# Altium footprint library CHIP-Library.PcbLib: 345 footprints (part 6 of 22)
Each footprint in its own frame and in the unit in brackets; x right, y up, seen from the top. Pads: shape width x height; smd on the part's side, far side on the other; paste and mask are expansions set on the pad; w line width, h text height; cw(c..) or ccw(c..) is an arc to the next point about the centre after c.
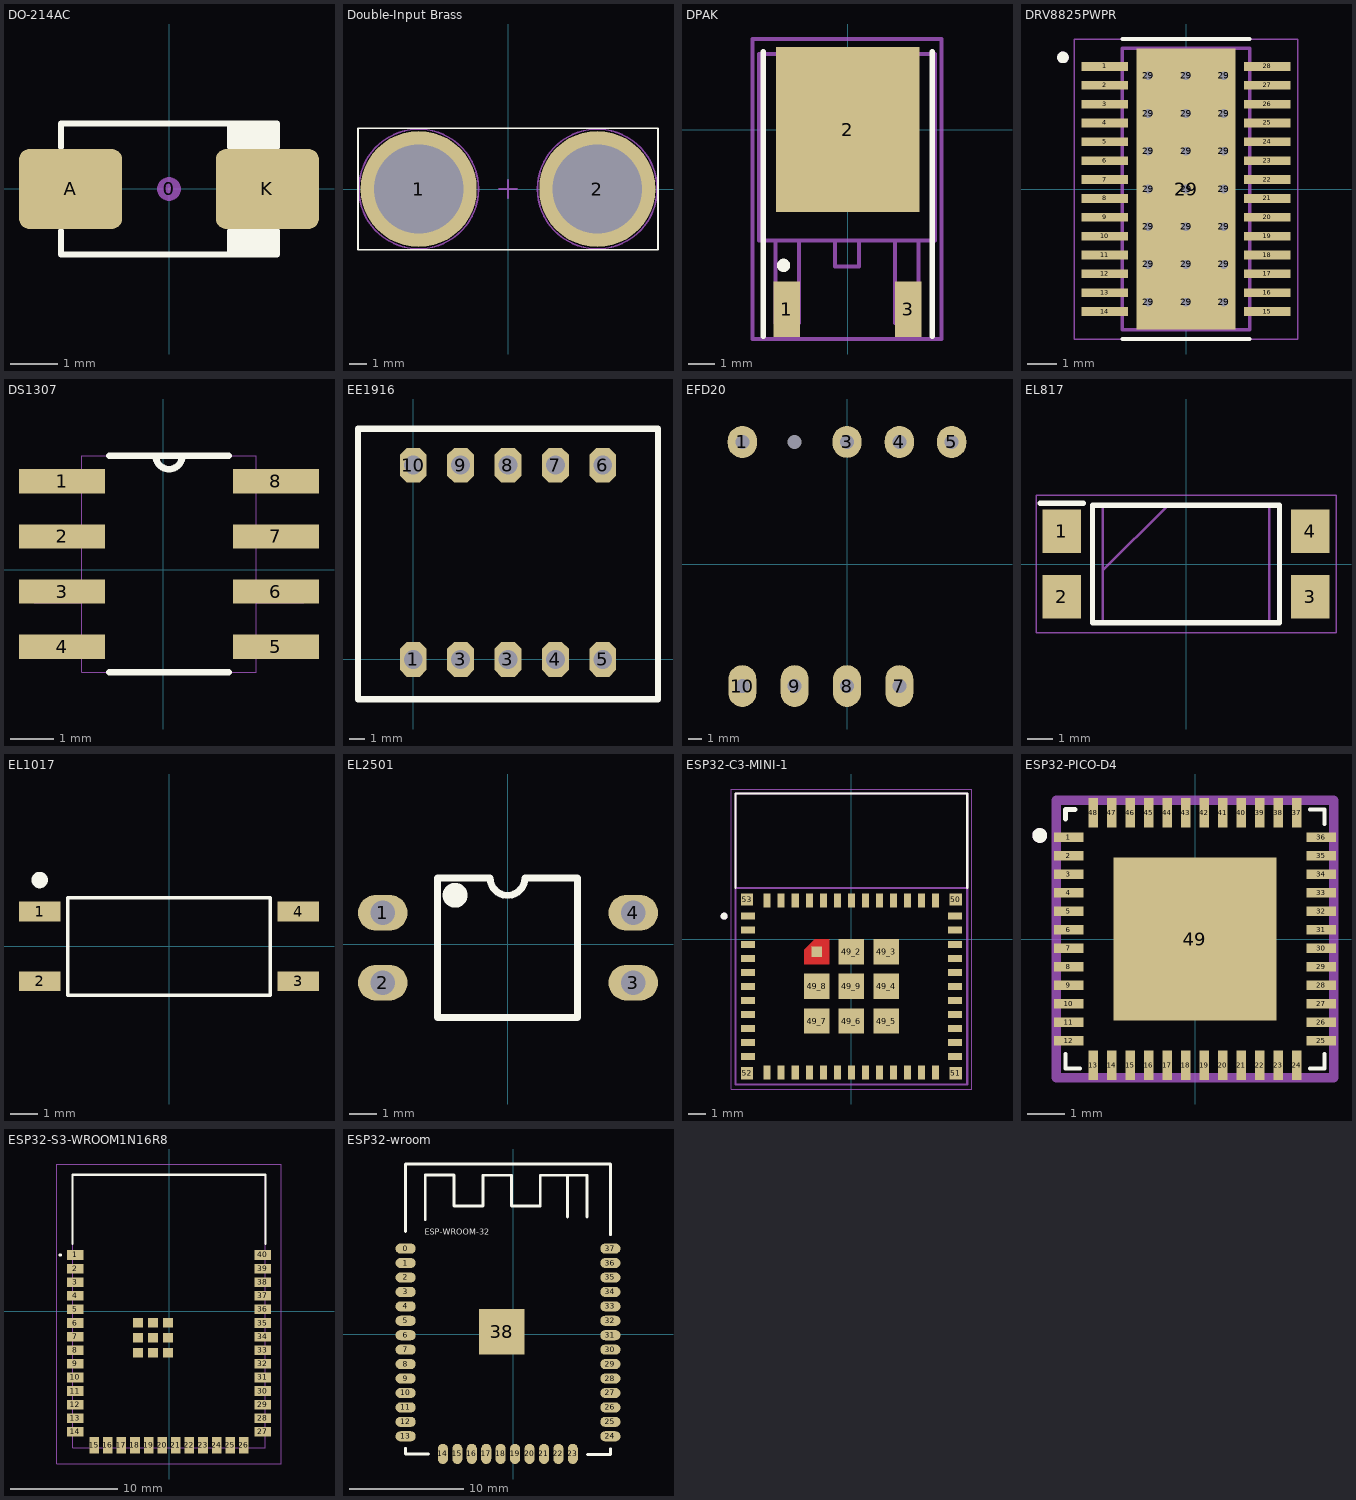
[diagram p5: the footprints below, top view; thin cyan lines are the x and y axes]

## DO-214AC [mm] "JEDEC DO214 variation AC. SMA"
height 2.5
pads (3):
  round 0.508 on Mech15: 0(0,0)
  rrect25% 2.2x1.7 smd: A(-2.1,0) K(2.1,0)
Top Overlay:
  rectangle: 1.3,0.9 2.3,1.4
  rectangle: 1.3,-1.4 2.3,-0.9
  lines w0.127: -2.3,-0.9 -2.3,-1.4 2.3,-1.4 2.3,-0.9 1.3,-0.9 1.3,-1.4 ; -2.3,0.9 -2.3,1.4 2.3,1.4 2.3,0.9 1.3,0.9 ; 1.3,0.911 1.3,1.4
3D body "SW3dPS-DO-214AC SMA.STEP": height 2.42, standoff 0.02, extent -2.6,-1.3 2.6,1.3

## Double-Input Brass [mm]
height 10.5
pads (2):
  round 6.5 hole 5: 1(-5,0) 2(5,0)
Top Overlay:
  lines w0.1: -8.4,-3.4 8.4,-3.4 8.4,3.4 -8.4,3.4 -8.4,-3.4
Mechanical 1:
  circle w0.1: c5,0 r3.35
  circle w0.1: c-5,0 r3.35
Mechanical 15:
  lines w0.1: -0.5,0 0.5,0 ; 0,-0.5 0,0.5
3D body: height 9, standoff -1, extent -7.54,-2.54 -2.46,2.54
3D body: height 9, standoff -1, extent 2.46,-2.54 7.54,2.54

## DPAK [mm]
height 9.45
pads (3):
  rect 1x2.1 smd: 1(-2.285,-6.75) 3(2.285,-6.75)
  rect 5.4x6.2 smd paste-3: 2(0,0)
Top Overlay:
  circle w0.25: c-2.41,-5.099 r0.125
  lines w0.2: -3.174,-7.766 -3.174,2.934 ; 3.176,-7.766 3.176,2.934
Top Paste:
  rectangle: 0.5,0.5 2.5,3
  rectangle: -2.5,0.5 -0.5,3
  rectangle: 0.5,-3 2.5,-0.5
  rectangle: -2.5,-3 -0.5,-0.5
Mechanical 4:
  lines w0.152: -3.326,-4.159 -3.326,2.851 ; -3.326,-4.159 3.278,-4.159 ; -3.326,-4.159 -3.326,2.851 ; -3.326,-4.159 3.278,-4.159 ; -3.326,2.851 3.278,2.851 ; -3.326,2.851 3.278,2.851 ; -2.717,-7.258 -1.828,-7.258 ; -2.717,-7.258 -2.717,-4.159 ; -2.717,-7.258 -1.828,-7.258 ; -2.717,-7.258 -2.717,-4.159 ; -2.717,-4.159 -1.828,-4.159 ; -2.717,-4.159 -1.828,-4.159 ; -1.828,-7.258 -1.828,-4.159 ; -1.828,-7.258 -1.828,-4.159 ; -0.482,-5.15 0.433,-5.15 ; -0.482,-5.15 -0.482,-4.159 -0.482,-5.15 ; -0.482,-5.15 0.433,-5.15 ; 0.433,-5.15 0.433,-4.159 0.433,-5.15 ; 1.779,-7.258 2.668,-7.258 ; 1.779,-7.258 1.779,-4.159 ; 1.779,-7.258 2.668,-7.258 ; 1.779,-7.258 1.779,-4.159 ; 1.779,-4.159 2.668,-4.159 ; 1.779,-4.159 2.668,-4.159 ; 2.668,-7.258 2.668,-4.159 ; 2.668,-7.258 2.668,-4.159 ; 3.278,-4.159 3.278,2.851 ; 3.278,-4.159 3.278,2.851
Mechanical 16:
  lines w0.152: -3.58,-7.868 -3.58,3.41 3.532,3.41 3.532,-7.868 -3.58,-7.868
3D body "User Library-Generic DPAK 3 lead.step": height 2.4, standoff 0, extent -3.391,-6.854 3.343,3.246

## Drop_Bottom [mm]
3D body "down 5.SLDPRT": height 21.01, standoff 6.01, extent -95.206,-97.761 114.764,162.239

## Drop_Top [mm]
3D body "28.SLDPRT": height 36.51, standoff 0.01, extent 17.272,-2.746 227.272,257.254

## DRV8825PWPR [mm] "HTSSOP-28"
pads (50):
  rect 1.6x0.3 smd paste-2 mask+0: 1(-2.8,4.225) 2(-2.8,3.575) 3(-2.8,2.925) 4(-2.8,2.275) 5(-2.8,1.625) 6(-2.8,0.975) 7(-2.8,0.325) 8(-2.8,-0.325) 9(-2.8,-0.975) 10(-2.8,-1.625) 11(-2.8,-2.275) 12(-2.8,-2.925) 13(-2.8,-3.575) 14(-2.8,-4.225) 15(2.8,-4.225) 16(2.8,-3.575) 17(2.8,-2.925) 18(2.8,-2.275) 19(2.8,-1.625) 20(2.8,-0.975) 21(2.8,-0.325) 22(2.8,0.325) 23(2.8,0.975) 24(2.8,1.625) 25(2.8,2.275) 26(2.8,2.925) 27(2.8,3.575) 28(2.8,4.225)
  round 0.5 hole 0.3 mask+0: 29(-1.3,-3.9) 29(-1.3,-2.6) 29(-1.3,-1.3) 29(-1.3,0) 29(-1.3,1.3) 29(-1.3,2.6) 29(-1.3,3.9) 29(0,-3.9) 29(0,-2.6) 29(0,-1.3) 29(0,0) 29(0,1.3) 29(0,2.6) 29(0,3.9) 29(1.3,-3.9) 29(1.3,-2.6) 29(1.3,-1.3) 29(1.3,0) 29(1.3,1.3) 29(1.3,2.6) 29(1.3,3.9)
  rect 3.4x9.7 smd paste-6 mask+0: 29(0,0)
Top Overlay:
  circle w0.2: c-4.24,4.535 r0.1
  lines w0.127: -2.2,-5.17 2.2,-5.17 ; -2.2,5.17 2.2,5.17
Top Paste:
  region: 3.575,-4.35 2.025,-4.35 2.025,-4.1 3.575,-4.1
  region: 3.575,-3.7 2.025,-3.7 2.025,-3.45 3.575,-3.45
  region: 3.575,-3.05 2.025,-3.05 2.025,-2.8 3.575,-2.8
  region: 3.575,-2.4 2.025,-2.4 2.025,-2.15 3.575,-2.15
  region: 3.575,-1.75 2.025,-1.75 2.025,-1.5 3.575,-1.5
  region: 3.575,-1.1 2.025,-1.1 2.025,-0.85 3.575,-0.85
  region: 3.575,-0.45 2.025,-0.45 2.025,-0.2 3.575,-0.2
  region: -2.025,-4.35 -3.575,-4.35 -3.575,-4.1 -2.025,-4.1
  region: -2.025,-3.7 -3.575,-3.7 -3.575,-3.45 -2.025,-3.45
  region: -2.025,-3.05 -3.575,-3.05 -3.575,-2.8 -2.025,-2.8
  region: -2.025,-2.4 -3.575,-2.4 -3.575,-2.15 -2.025,-2.15
  region: -2.025,-1.75 -3.575,-1.75 -3.575,-1.5 -2.025,-1.5
  region: -2.025,-1.1 -3.575,-1.1 -3.575,-0.85 -2.025,-0.85
  region: -2.025,-0.45 -3.575,-0.45 -3.575,-0.2 -2.025,-0.2
  region: 3.575,0.2 2.025,0.2 2.025,0.45 3.575,0.45
  region: -2.025,0.2 -3.575,0.2 -3.575,0.45 -2.025,0.45
  region: 3.575,0.85 2.025,0.85 2.025,1.1 3.575,1.1
  region: -2.025,0.85 -3.575,0.85 -3.575,1.1 -2.025,1.1
  region: 3.575,1.5 2.025,1.5 2.025,1.75 3.575,1.75
  region: -2.025,1.5 -3.575,1.5 -3.575,1.75 -2.025,1.75
  region: 3.575,2.15 2.025,2.15 2.025,2.4 3.575,2.4
  region: -2.025,2.15 -3.575,2.15 -3.575,2.4 -2.025,2.4
  region: 3.575,2.8 2.025,2.8 2.025,3.05 3.575,3.05
  region: -2.025,2.8 -3.575,2.8 -3.575,3.05 -2.025,3.05
  region: 3.575,3.45 2.025,3.45 2.025,3.7 3.575,3.7
  region: -2.025,3.45 -3.575,3.45 -3.575,3.7 -2.025,3.7
  region: 3.575,4.1 2.025,4.1 2.025,4.35 3.575,4.35
  region: -2.025,4.1 -3.575,4.1 -3.575,4.35 -2.025,4.35
  region: 1.2,-3.23 -1.2,-3.23 -1.2,3.23 1.2,3.23
Top Solder:
  region: 3.67,-4.445 1.93,-4.445 1.93,-4.005 3.67,-4.005
  region: 3.67,-3.795 1.93,-3.795 1.93,-3.355 3.67,-3.355
  region: 3.67,-3.145 1.93,-3.145 1.93,-2.705 3.67,-2.705
  region: 3.67,-2.495 1.93,-2.495 1.93,-2.055 3.67,-2.055
  region: 3.67,-1.845 1.93,-1.845 1.93,-1.405 3.67,-1.405
  region: 3.67,-1.195 1.93,-1.195 1.93,-0.755 3.67,-0.755
  region: 3.67,-0.545 1.93,-0.545 1.93,-0.105 3.67,-0.105
  region: -1.93,-4.445 -3.67,-4.445 -3.67,-4.005 -1.93,-4.005
  region: -1.93,-3.795 -3.67,-3.795 -3.67,-3.355 -1.93,-3.355
  region: -1.93,-3.145 -3.67,-3.145 -3.67,-2.705 -1.93,-2.705
  region: -1.93,-2.495 -3.67,-2.495 -3.67,-2.055 -1.93,-2.055
  region: -1.93,-1.845 -3.67,-1.845 -3.67,-1.405 -1.93,-1.405
  region: -1.93,-1.195 -3.67,-1.195 -3.67,-0.755 -1.93,-0.755
  region: -1.93,-0.545 -3.67,-0.545 -3.67,-0.105 -1.93,-0.105
  region: 3.67,0.105 1.93,0.105 1.93,0.545 3.67,0.545
  region: -1.93,0.105 -3.67,0.105 -3.67,0.545 -1.93,0.545
  region: 3.67,0.755 1.93,0.755 1.93,1.195 3.67,1.195
  region: -1.93,0.755 -3.67,0.755 -3.67,1.195 -1.93,1.195
  region: 3.67,1.405 1.93,1.405 1.93,1.845 3.67,1.845
  region: -1.93,1.405 -3.67,1.405 -3.67,1.845 -1.93,1.845
  region: 3.67,2.055 1.93,2.055 1.93,2.495 3.67,2.495
  region: -1.93,2.055 -3.67,2.055 -3.67,2.495 -1.93,2.495
  region: 3.67,2.705 1.93,2.705 1.93,3.145 3.67,3.145
  region: -1.93,2.705 -3.67,2.705 -3.67,3.145 -1.93,3.145
  region: 3.67,3.355 1.93,3.355 1.93,3.795 3.67,3.795
  region: -1.93,3.355 -3.67,3.355 -3.67,3.795 -1.93,3.795
  region: 3.67,4.005 1.93,4.005 1.93,4.445 3.67,4.445
  region: -1.93,4.005 -3.67,4.005 -3.67,4.445 -1.93,4.445
  region: 1.2,-3.23 -1.2,-3.23 -1.2,3.23 1.2,3.23
Mechanical 13:
  circle w0.2: c-4.24,4.535 r0.1
  lines w0.127: -2.2,-4.85 -2.2,4.85 2.2,4.85 2.2,-4.85 -2.2,-4.85
Mechanical 15:
  lines w0.05: -3.85,-5.17 -3.85,5.17 3.85,5.17 3.85,-5.17 -3.85,-5.17
3D body "DRV8825PWPR--3DModel-STEP-56544 (1).STEP": height 1.2, standoff 0, extent -3.2,-4.826 3.2,4.874

## DS1307 [mil]
pads (8):
  rect 78x22 smd: 1(-92,80) 2(-92,30) 3(-92,-20) 4(-92,-70) 5(102,-70) 6(102,-20) 7(102,30) 8(102,80)
Top Overlay:
  lines w6: -49,-93 59,-93 ; -49,103 -7,103 ; 59,103 17,103 ; -7,103 ccw(c5,103) 17,103 ; -7,103 17,103
Mechanical 4:
  lines w0: -117,-80 -74,-80 ; -117,-80 -117,-60 ; -117,-80 -74,-80 ; -117,-80 -117,-60 ; -117,-60 -74,-60 ; -117,-60 -74,-60 ; -117,-30 -74,-30 ; -117,-30 -117,-10 ; -117,-30 -74,-30 ; -117,-30 -117,-10 ; -117,-10 -74,-10 ; -117,-10 -74,-10 ; -117,20 -74,20 ; -117,20 -117,40 ; -117,20 -74,20 ; -117,20 -117,40 ; -117,40 -74,40 ; -117,40 -74,40 ; -117,70 -74,70 ; -117,70 -117,90 ; -117,70 -74,70 ; -117,70 -117,90 ; -117,90 -74,90 ; -117,90 -74,90 ; -74,-93 -74,103 ; -74,-93 84,-93 ; -74,-93 -74,103 ; -74,-93 84,-93 ; -74,-80 -74,-60 ; -74,-80 -74,-60 ; -74,-30 -74,-10 ; -74,-30 -74,-10 ; -74,20 -74,40 ; -74,20 -74,40 ; -74,70 -74,90 ; -74,70 -74,90 ; -74,103 -7,103 ; -74,103 -7,103 ; -7,103 ccw(c5,103) 17,103 ; -7,103 ccw(c5,103) 17,103 ; -7,103 17,103 ; -7,103 17,103 ; 17,103 84,103 ; 17,103 84,103 ; 84,-93 84,103 ; 84,-93 84,103 ; 84,-80 127,-80 ; 84,-80 84,-60 ; 84,-80 127,-80 ; 84,-80 84,-60 ; 84,-60 127,-60 ; 84,-60 127,-60 ; 84,-30 127,-30 ; 84,-30 84,-10 ; 84,-30 127,-30 ; 84,-30 84,-10 ; 84,-10 127,-10 ; 84,-10 127,-10 ; 84,20 127,20 ; 84,20 84,40 ; 84,20 127,20 ; 84,20 84,40 ; 84,40 127,40 ; 84,40 127,40 ; 84,70 127,70 ; 84,70 84,90 ; 84,70 127,70 ; 84,70 84,90 ; 84,90 127,90 ; 84,90 127,90 ; 127,-80 127,-60 ; 127,-80 127,-60 ; 127,-30 127,-10 ; 127,-30 127,-10 ; 127,20 127,40 ; 127,20 127,40 ; 127,70 127,90 ; 127,70 127,90
3D body "MAX1562ESA+--3DModel-STEP-56544.STEP": height 59.56, standoff -9.34, extent -113.1,-91.46 123.11,101.46

## EE1916 [mm]
height 1.91
pads (10):
  oct 1.7x2.2 hole 1.2: 1(0,0) 3(3,0) 3(6,0) 4(9,0) 5(12,0) 6(12,12.3) 7(9,12.3) 8(6,12.3) 9(3,12.3) 10(0,12.3)
Top Overlay:
  lines w0.4: -3.5,-2.514 -3.5,14.6 15.5,14.6 15.5,-2.514 -3.5,-2.514
3D body "User Library-IND-EE19-7680651.step": height 14.5, standoff -5.55, extent -4.15,-2.3 16.15,14.5

## EFD20 [mm]
height 1.91
pads (9):
  oval 2.1x2.3 / inner round 0 / far side round 0 hole 1: 1(-7.5,8.75) 4(3.75,8.75)
  round 0 hole 1: 2(-3.75,8.75)
  oval 2.083x2.286 / inner round 0 / far side round 0 hole 1: 3(0,8.75)
  oval 2.1x2.3 hole 1: 5(7.5,8.75)
  oval 2x3 hole 1: 7(3.75,-8.75) 8(0,-8.75) 9(-3.75,-8.75) 10(-7.5,-8.75)
Bottom Overlay:
  lines w0.1: -10.75,-7.694 10.75,-7.694 ; -10.75,7.694 10.75,7.694 ; -7.62,-7.694 -7.62,7.694 ; 7.62,-7.694 7.62,7.694 ; -10.75,-10.75 -10.75,10.75 10.75,10.75 10.75,-10.75 -10.75,-10.75

## EL817 [mm]
pads (4):
  rect 1.5x1.7 smd: 1(-4.85,1.27) 2(-4.85,-1.27) 3(4.85,-1.27) 4(4.85,1.27)
Top Overlay:
  lines w0.2: -5.7,2.37 -4,2.37 ; -3.65,-2.29 3.65,-2.29 3.65,2.29 -3.65,2.29 -3.65,-2.29
Mechanical 13:
  lines w0.1: -3.25,-0.25 -0.71,2.29 ; -3.25,-2.29 3.25,-2.29 3.25,2.29 -3.25,2.29 -3.25,-2.29
Mechanical 15:
  lines w0.05: -5.85,-2.69 5.85,-2.69 5.85,2.69 -5.85,2.69 -5.85,-2.69
3D body "EL817_S__A__TA_-G.stp": height 5, standoff 0, extent -5.15,-2.29 5.15,2.29

## EL1017 [mm] "SOP-4-P2.54-Long"
pads (4):
  rect 1.5x0.711 smd: 1(-4.7,1.27) 2(-4.7,-1.27) 3(4.7,-1.27) 4(4.7,1.27)
Top Overlay:
  circle w0.3: c-4.699,2.413 r0.15
  lines w0.127: -3.683,-1.778 3.683,-1.778 3.683,1.778 -3.683,1.778 -3.683,-1.778
3D body "SOP-4-2.54-Long.STEP": height 1.93, standoff -0.01, extent -5.1,-1.8 5.1,1.8

## EL2501 [mm] "4 PIN DIP PHOTOTRANSISTOR  PHOTOCOUPLER  DIP-4"
pads (4):
  oval 1.8x1.3 hole 0.9: 1(-4.532,1.143) 2(-4.532,-1.397) 3(4.568,-1.397) 4(4.568,1.143)
Top Overlay:
  circle w0.5: c-1.905,1.778 r0.2
  lines w0.254: -2.54,-2.667 2.54,-2.667 2.54,2.413 0.635,2.413 cw(c0,2.413) -0.635,2.413 -2.54,2.413 -2.54,-2.667
3D body "User Library-DIP-4.step": height 3.51, standoff -3.79, extent -3.935,-2.421 3.935,2.159

## ESP32-C3-MINI-1 [mm]
height 2.55
pads (61):
  rect 0.8x0.4 smd: 1(-5.9,1.3) 2(-5.9,0.5) 3(-5.9,-0.3) 4(-5.9,-1.1) 5(-5.9,-1.9) 6(-5.9,-2.7) 7(-5.9,-3.5) 8(-5.9,-4.3) 9(-5.9,-5.1) 10(-5.9,-5.9) 11(-5.9,-6.7) 25(5.9,-6.7) 26(5.9,-5.9) 27(5.9,-5.1) 28(5.9,-4.3) 29(5.9,-3.5) 30(5.9,-2.7) 31(5.9,-1.9) 32(5.9,-1.1) 33(5.9,-0.3) 34(5.9,0.5) 35(5.9,1.3)
  rect 0.4x0.8 smd: 12(-4.8,-7.6) 13(-4,-7.6) 14(-3.2,-7.6) 15(-2.4,-7.6) 16(-1.6,-7.6) 17(-0.8,-7.6) 18(0,-7.6) 19(0.8,-7.6) 20(1.6,-7.6) 21(2.4,-7.6) 22(3.2,-7.6) 23(4,-7.6) 24(4.8,-7.6) 36(4.8,2.2) 37(4,2.2) 38(3.2,2.2) 39(2.4,2.2) 40(1.6,2.2) 41(0.8,2.2) 42(0,2.2) 43(-0.8,2.2) 44(-1.6,2.2) 45(-2.4,2.2) 46(-3.2,2.2) 47(-4,2.2) 48(-4.8,2.2)
  rect 0.6x0.6 smd paste-1 mask+0: 49_1(-1.975,-0.725)
  rect 1.45x1.45 smd: 49_2(0,-0.725) 49_3(1.975,-0.725) 49_4(1.975,-2.7) 49_5(1.975,-4.675) 49_6(0,-4.675) 49_7(-1.975,-4.675) 49_8(-1.975,-2.7) 49_9(0,-2.7)
  rect 0.7x0.7 smd: 50(5.95,2.25) 51(5.95,-7.65) 52(-5.95,-7.65) 53(-5.95,2.25)
Top Layer:
  region: -1.25,-1.45 -2.7,-1.45 -2.7,-0.6 -2.1,0 -1.25,0
Top Overlay:
  circle w0.2: c-7.25,1.3 r0.1
  lines w0.127: -6.6,2.92 -6.6,8.3 6.6,8.3 6.6,2.92
Top Paste:
  region: -1.25,-1.45 -2.7,-1.45 -2.7,-0.6 -2.1,0 -1.25,0
Top Solder:
  region: -1.15,-1.55 -2.8,-1.55 -2.8,-0.56 -2.14,0.1 -1.15,0.1
Mechanical 13:
  circle w0.2: c-7.25,1.3 r0.1
  lines w0.127: -6.6,2.9 6.6,2.9 ; -6.6,2.9 -6.6,8.3 6.6,8.3 6.6,2.9 ; -6.6,2.9 -6.6,-8.3 6.6,-8.3 6.6,2.9
Mechanical 15:
  lines w0.05: -6.85,-8.55 6.85,-8.55 6.85,8.55 -6.85,8.55 -6.85,-8.55
3D body "ESP32-C3-MINI-1-N4--3DModel-STEP-418109.STEP": height 2.55, standoff 0, extent -6.6,-8.3 6.6,8.3

## ESP32-PICO-D4 [mm]
pads (49):
  rect 0.8x0.25 smd paste-0.8: 1(-3.413,2.75) 2(-3.413,2.25) 3(-3.413,1.75) 4(-3.413,1.25) 5(-3.413,0.75) 6(-3.413,0.25) 7(-3.413,-0.25) 8(-3.413,-0.75) 9(-3.413,-1.25) 10(-3.413,-1.75) 11(-3.413,-2.25) 12(-3.413,-2.75) 25(3.413,-2.75) 26(3.413,-2.25) 27(3.413,-1.75) 28(3.413,-1.25) 29(3.413,-0.75) 30(3.413,-0.25) 31(3.413,0.25) 32(3.413,0.75) 33(3.413,1.25) 34(3.413,1.75) 35(3.413,2.25)
  rect 0.25x0.8 smd paste-0.8: 13(-2.75,-3.413) 14(-2.25,-3.413) 15(-1.75,-3.413) 16(-1.25,-3.413) 17(-0.75,-3.413) 18(-0.25,-3.413) 19(0.25,-3.413) 20(0.75,-3.413) 21(1.25,-3.413) 22(1.75,-3.413) 23(2.25,-3.413) 24(2.75,-3.413) 37(2.75,3.413) 38(2.25,3.413) 39(1.75,3.413) 40(1.25,3.413) 41(0.75,3.413) 42(0.25,3.413) 43(-0.25,3.413) 44(-0.75,3.413) 45(-1.25,3.413) 46(-1.75,3.413) 47(-2.25,3.413) 48(-2.75,3.413)
  rect 0.8x0.25 smd paste-0.2: 36(3.413,2.75)
  rect 4.4x4.4 smd paste-1.5: 49(0,0)
Top Overlay:
  circle w0.2: c-4.2,2.8 r0.1
  lines w0.1: -3.5,-3.1 -3.5,-3.5 -3.1,-3.5 ; 3.1,-3.5 3.5,-3.5 3.5,-3.1 ; 3.1,3.5 3.5,3.5 3.5,3.1
  lines w0.127: -3.5,3.245 -3.5,3.5 -3.245,3.5
Top Paste:
  rectangle: -3.663,1.625 -3.163,1.875
  rectangle: 3.163,2.625 3.663,2.875
  region: -2.125,3.188 -2.125,3.688 -2.375,3.688 -2.375,3.188
  region: -2.625,3.188 -2.625,3.688 -2.875,3.688 -2.875,3.188
  region: 2.875,3.188 2.875,3.688 2.625,3.688 2.625,3.188
  region: 2.375,3.188 2.375,3.688 2.125,3.688 2.125,3.188
  region: 1.875,3.188 1.875,3.688 1.625,3.688 1.625,3.188
  region: 1.375,3.188 1.375,3.688 1.125,3.688 1.125,3.188
  region: 0.875,3.188 0.875,3.688 0.625,3.688 0.625,3.188
  region: 0.375,3.188 0.375,3.688 0.125,3.688 0.125,3.188
  region: -0.125,3.188 -0.125,3.688 -0.375,3.688 -0.375,3.188
  region: -0.625,3.188 -0.625,3.688 -0.875,3.688 -0.875,3.188
  region: -1.125,3.188 -1.125,3.688 -1.375,3.688 -1.375,3.188
  region: -1.625,3.188 -1.625,3.688 -1.875,3.688 -1.875,3.188
  region: -2.125,-3.638 -2.125,-3.138 -2.375,-3.138 -2.375,-3.638
  region: -2.625,-3.638 -2.625,-3.138 -2.875,-3.138 -2.875,-3.638
  region: 2.875,-3.638 2.875,-3.138 2.625,-3.138 2.625,-3.638
  region: 2.375,-3.638 2.375,-3.138 2.125,-3.138 2.125,-3.638
  region: 1.875,-3.638 1.875,-3.138 1.625,-3.138 1.625,-3.638
  region: 1.375,-3.638 1.375,-3.138 1.125,-3.138 1.125,-3.638
  region: 0.875,-3.638 0.875,-3.138 0.625,-3.138 0.625,-3.638
  region: 0.375,-3.638 0.375,-3.138 0.125,-3.138 0.125,-3.638
  region: -0.125,-3.638 -0.125,-3.138 -0.375,-3.138 -0.375,-3.638
  region: -0.625,-3.638 -0.625,-3.138 -0.875,-3.138 -0.875,-3.638
  region: -1.125,-3.638 -1.125,-3.138 -1.375,-3.138 -1.375,-3.638
  region: -1.625,-3.638 -1.625,-3.138 -1.875,-3.138 -1.875,-3.638
  rectangle: -3.663,2.125 -3.163,2.375
  rectangle: -3.663,2.625 -3.163,2.875
  rectangle: -3.663,-2.875 -3.163,-2.625
  rectangle: -3.663,-2.375 -3.163,-2.125
  rectangle: -3.663,-1.875 -3.163,-1.625
  rectangle: -3.663,-1.375 -3.163,-1.125
  rectangle: -3.663,-0.875 -3.163,-0.625
  rectangle: -3.663,-0.375 -3.163,-0.125
  rectangle: -3.663,0.125 -3.163,0.375
  rectangle: -3.663,0.625 -3.163,0.875
  rectangle: -3.663,1.125 -3.163,1.375
  rectangle: 3.163,2.125 3.663,2.375
  rectangle: 3.163,-2.875 3.663,-2.625
  rectangle: 3.163,-2.375 3.663,-2.125
  rectangle: 3.163,-1.875 3.663,-1.625
  rectangle: 3.163,-1.375 3.663,-1.125
  rectangle: 3.163,-0.875 3.663,-0.625
  rectangle: 3.163,-0.375 3.663,-0.125
  rectangle: 3.163,0.125 3.663,0.375
  rectangle: 3.163,0.625 3.663,0.875
  rectangle: 3.163,1.125 3.663,1.375
  rectangle: 3.163,1.625 3.663,1.875
  region: 0.934,-0.894 2.1,-0.894 2.1,-1.75 0.934,-1.75
  region: 0.934,0.656 2.1,0.656 2.1,-0.7 0.934,-0.7
  region: 0.934,1.75 2.1,1.75 2.1,0.878 0.934,0.878
  region: -2.1,-0.894 -0.934,-0.894 -0.934,-1.75 -2.1,-1.75
  region: -0.7,-0.894 0.616,-0.894 0.616,-1.75 -0.7,-1.75
  region: -2.1,0.656 -0.934,0.656 -0.934,-0.7 -2.1,-0.7
  region: -2.1,1.75 -0.934,1.75 -0.934,0.878 -2.1,0.878
  region: -0.7,1.75 0.616,1.75 0.616,0.878 -0.7,0.878
Top Courtyard:
  lines w0.254: -3.75,-3.75 -3.75,3.75 3.75,3.75 3.75,-3.75 -3.75,-3.75
Mechanical 13:
  circle w0.2: c-4.2,2.8 r0.1
Mechanical 15:
  lines w0.05: -3.75,-3.75 3.75,-3.75 3.75,3.75 -3.75,3.75 -3.75,-3.75
3D body "step_temp.STEP": height 1.04, standoff 0, extent -3.5,-3.5 3.5,3.5

## ESP32-S3-WROOM1N16R8 [mm]
pads (49):
  rect 1.5x0.9 smd: 1(-8.75,5.26) 2(-8.75,3.99) 3(-8.75,2.72) 4(-8.75,1.45) 5(-8.75,0.18) 6(-8.75,-1.09) 7(-8.75,-2.36) 8(-8.75,-3.63) 9(-8.75,-4.9) 10(-8.75,-6.17) 11(-8.75,-7.44) 12(-8.75,-8.71) 13(-8.75,-9.98) 14(-8.75,-11.25) 27(8.75,-11.25) 28(8.75,-9.98) 29(8.75,-8.71) 30(8.75,-7.44) 31(8.75,-6.17) 32(8.75,-4.9) 33(8.75,-3.63) 34(8.75,-2.36) 35(8.75,-1.09) 36(8.75,0.18) 37(8.75,1.45) 38(8.75,2.72) 39(8.75,3.99) 40(8.75,5.26)
  rect 0.9x1.5 smd: 15(-6.985,-12.5) 16(-5.715,-12.5) 17(-4.445,-12.5) 18(-3.175,-12.5) 19(-1.905,-12.5) 20(-0.635,-12.5) 21(0.635,-12.5) 22(1.905,-12.5) 23(3.175,-12.5) 24(4.445,-12.5) 25(5.715,-12.5) 26(6.985,-12.5)
  rect 0.9x0.9 smd: EPAD(-2.9,-3.86) EPAD(-2.9,-2.46) EPAD(-2.9,-1.06) EPAD(-1.5,-3.86) EPAD(-1.5,-2.46) EPAD(-1.5,-1.06) EPAD(-0.1,-3.86) EPAD(-0.1,-2.46) EPAD(-0.1,-1.06)
Top Overlay:
  lines w0.2: -9,6.3 -9,12.75 9,12.75 9,6.3 ; -10.2,5.26 ccw(c-10.15,5.26) -10.1,5.26 ; -10.2,5.26 cw(c-10.15,5.26) -10.1,5.26 ; -10.2,5.26 ccw(c-10.15,5.26) -10.1,5.26
Mechanical 15:
  lines w0.1: -9,-12.75 9,-12.75 9,12.75 -9,12.75 -9,-12.75
Mechanical 20:
  lines w0.1: -10.5,-14.25 10.5,-14.25 10.5,13.75 -10.5,13.75 -10.5,-14.25
3D body "ESP32-S3-WROOM-1 3D Model.STEP": height 3.1, standoff 0, extent -9,-12.75 9,12.75

## ESP32-wroom [mil]
pads (39):
  oval 70x35 smd: 0(-372,296) 1(-372,246) 2(-372,196) 3(-372,146) 4(-372,96) 5(-372,46) 6(-372,-4) 7(-372,-54) 8(-372,-104) 9(-372,-154) 10(-372,-204) 11(-372,-254) 12(-372,-304) 13(-372,-354) 24(337,-354) 25(337,-304) 26(337,-254) 27(337,-204) 28(337,-154) 29(337,-104) 30(337,-54) 31(337,-4) 32(337,46) 33(337,96) 34(337,146) 35(337,196) 36(337,246) 37(337,296)
  oval 35x70 smd: 14(-243,-415) 15(-193,-415) 16(-143,-415) 17(-93,-415) 18(-43,-415) 19(7,-415) 20(57,-415) 21(107,-415) 22(157,-415) 23(207,-415)
  rect 157.5x157.5 smd: 38(-39.37,7.87)
Top Overlay:
  lines w10: -372,-395.31 -372,-415 -293.26,-415 ; -372,355 -372,586.85 ; -372,589 337,589 337,344 ; -304,396 -304,551 -204,551 -204,443 -104,443 -104,550 -5,550 -5,443 94,443 94,550 256,550 256,405 ; 188,405 188,550 ; 258.26,-416.97 337,-416.97 337,-397.28
  text "ESP-WROOM-32" at -306,344 h20
3D body "ESP32-WROOM-32D--3DModel-STEP-56544.STEP": height 128.46, standoff 0.5, extent -371.66,-416.97 337,586.97